# Altium footprint library WR-FPC_0.50mm.PcbLib: 147 footprints (part 10 of 10)
Each footprint in its own frame and in the unit in brackets; x right, y up, seen from the top. Pads: shape width x height; smd on the part's side, far side on the other; paste and mask are expansions set on the pad; w line width, h text height; cw(c..) or ccw(c..) is an arc to the next point about the centre after c.
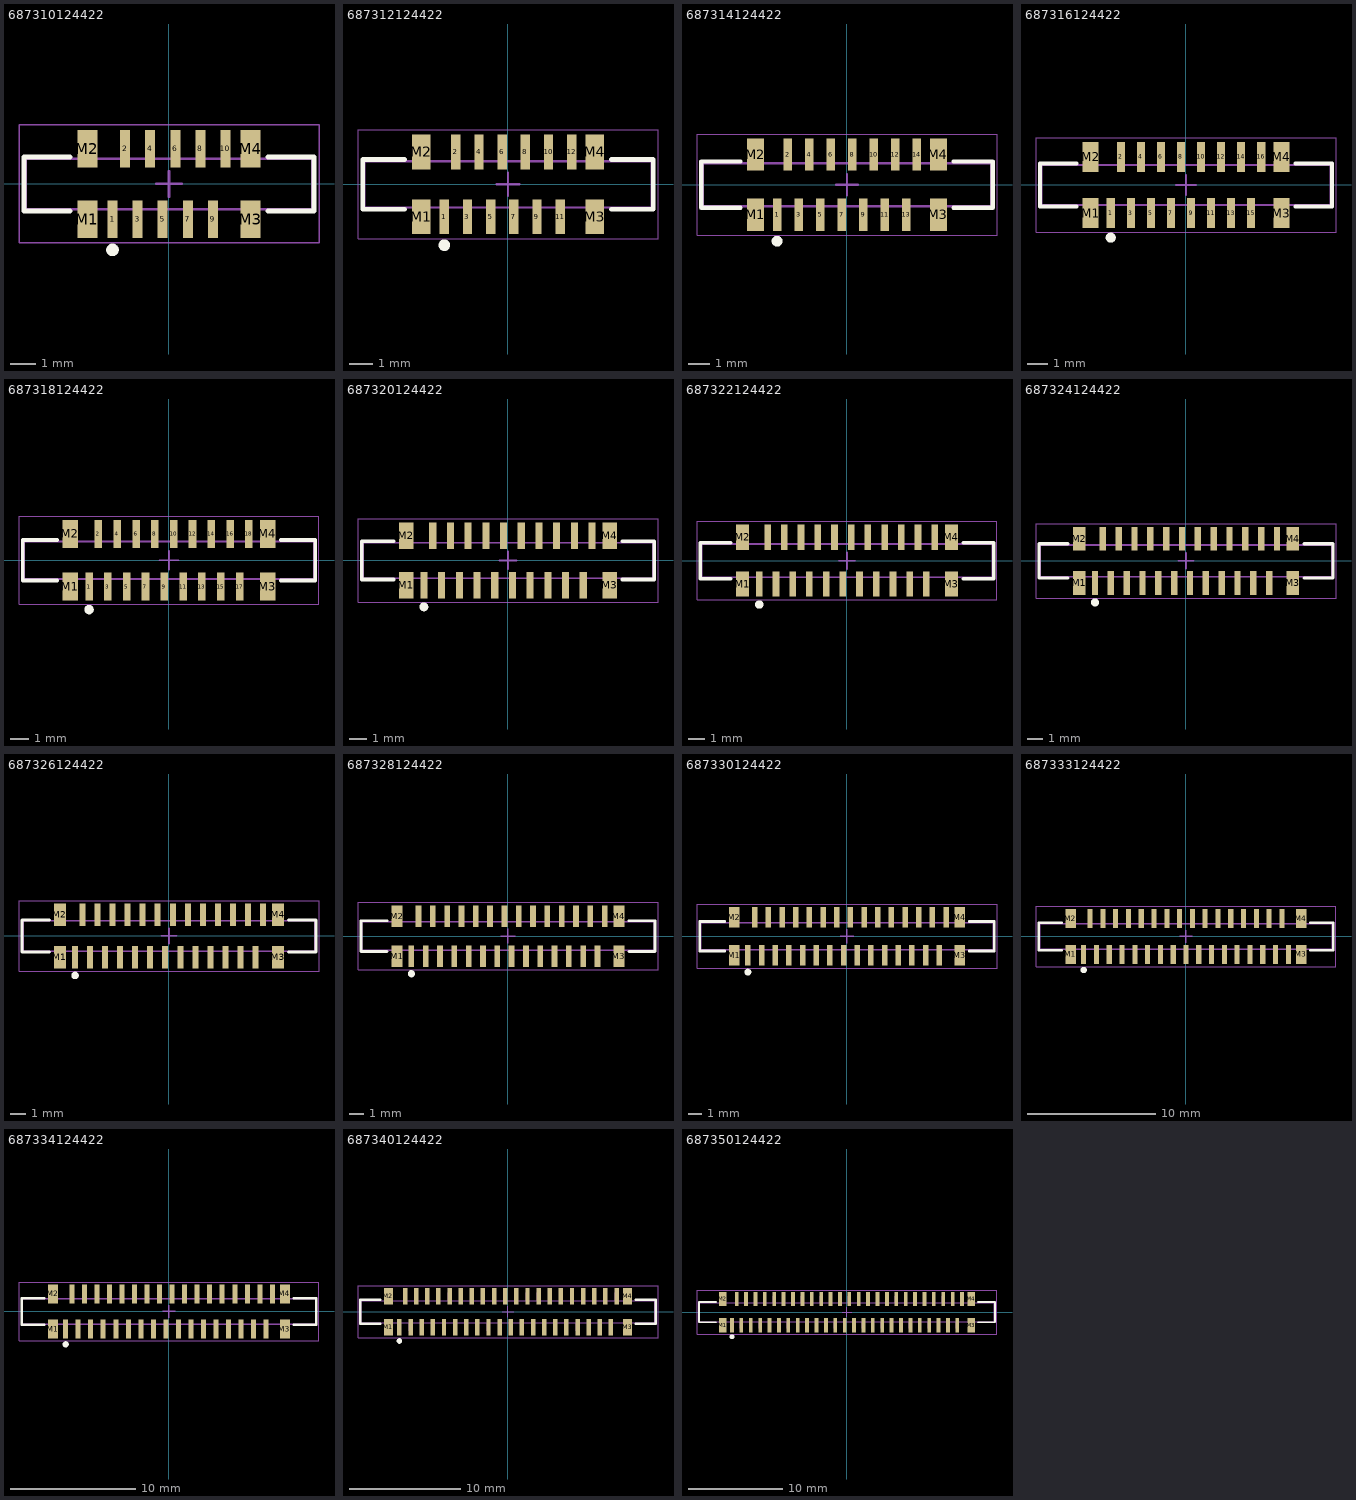
[diagram p9: the footprints below, top view; thin cyan lines are the x and y axes]

## 687310124422 [mm] "ZIF Connectors, Vertical, Type A, pitch 0.5mm, 10p"
height 4.5
pads (14):
  rect 0.4x1.5 smd: 1(-2.25,-1.4) 2(-1.75,1.4) 3(-1.25,-1.4) 4(-0.75,1.4) 5(-0.25,-1.4) 6(0.25,1.4) 7(0.75,-1.4) 8(1.25,1.4) 9(1.75,-1.4) 10(2.25,1.4)
  rect 0.8x1.5 smd: M1(-3.25,-1.4) M2(-3.25,1.4) M3(3.25,-1.4) M4(3.25,1.4)
Top Overlay:
  circle w0.25: c-2.25,-2.625 r0.125
  lines w0.2: -3.95,-1.075 -5.775,-1.075 -5.775,1.075 -3.95,1.075 ; 3.95,-1.075 5.775,-1.075 5.775,1.075 3.95,1.075
Top Assembly:
  lines w0.1: -3.35,-1 -3.35,-1.75 -3.15,-1.75 -3.15,-1 ; -3.35,1 -3.35,1.75 -3.15,1.75 -3.15,1 ; -2.35,-1 -2.35,-1.7 -2.15,-1.7 -2.15,-1 ; -1.85,1 -1.85,1.7 -1.65,1.7 -1.65,1 ; -1.35,-1 -1.35,-1.7 -1.15,-1.7 -1.15,-1 ; -0.85,1 -0.85,1.7 -0.65,1.7 -0.65,1 ; -0.35,-1 -0.35,-1.7 -0.15,-1.7 -0.15,-1 ; 0.15,1 0.15,1.7 0.35,1.7 0.35,1 ; 0.65,-1 0.65,-1.7 0.85,-1.7 0.85,-1 ; 1.15,1 1.15,1.7 1.35,1.7 1.35,1 ; 1.65,-1 1.65,-1.7 1.85,-1.7 1.85,-1 ; 2.15,1 2.15,1.7 2.35,1.7 2.35,1 ; 3.15,-1 3.15,-1.75 3.35,-1.75 3.35,-1 ; 3.15,1 3.15,1.75 3.35,1.75 3.35,1 ; -5.7,-1 5.7,-1 5.7,1 -5.7,1 -5.7,-1
Top Designator:
  text ".Designator" at -3.647,-0.357 h1
Top 3D Body:
  lines w0.1: -3.35,-1 -3.35,-1.75 -3.15,-1.75 -3.15,-1 ; -3.35,1 -3.35,1.75 -3.15,1.75 -3.15,1 ; -2.35,-1 -2.35,-1.7 -2.15,-1.7 -2.15,-1 ; -1.85,1 -1.85,1.7 -1.65,1.7 -1.65,1 ; -1.35,-1 -1.35,-1.7 -1.15,-1.7 -1.15,-1 ; -0.85,1 -0.85,1.7 -0.65,1.7 -0.65,1 ; -0.35,-1 -0.35,-1.7 -0.15,-1.7 -0.15,-1 ; 0.15,1 0.15,1.7 0.35,1.7 0.35,1 ; 0.65,-1 0.65,-1.7 0.85,-1.7 0.85,-1 ; 1.15,1 1.15,1.7 1.35,1.7 1.35,1 ; 1.65,-1 1.65,-1.7 1.85,-1.7 1.85,-1 ; 2.15,1 2.15,1.7 2.35,1.7 2.35,1 ; 3.15,-1 3.15,-1.75 3.35,-1.75 3.35,-1 ; 3.15,1 3.15,1.75 3.35,1.75 3.35,1 ; -5.7,-1 -5.7,1 5.7,1 5.7,-1 -5.7,-1
Top Courtyard:
  lines w0.05: -5.975,-2.35 5.975,-2.35 5.975,2.35 -5.975,2.35 -5.975,-2.35
Top Component Center:
  lines w0.1: -0.5,0 0.5,0 ; 0,-0.5 0,0.5
3D body "687310124422.stp": height 4.92, standoff 0.02, extent -5.7,-1.75 5.7,1.75

## 687312124422 [mm] "ZIF Connectors, Vertical, Type A, pitch 0.5mm, 12p"
height 4.5
pads (16):
  rect 0.4x1.5 smd: 1(-2.75,-1.4) 2(-2.25,1.4) 3(-1.75,-1.4) 4(-1.25,1.4) 5(-0.75,-1.4) 6(-0.25,1.4) 7(0.25,-1.4) 8(0.75,1.4) 9(1.25,-1.4) 10(1.75,1.4) 11(2.25,-1.4) 12(2.75,1.4)
  rect 0.8x1.5 smd: M1(-3.75,-1.4) M2(-3.75,1.4) M3(3.75,-1.4) M4(3.75,1.4)
Top Overlay:
  circle w0.25: c-2.75,-2.625 r0.125
  lines w0.2: -4.45,-1.075 -6.275,-1.075 -6.275,1.075 -4.45,1.075 ; 4.45,-1.075 6.275,-1.075 6.275,1.075 4.45,1.075
Top Assembly:
  lines w0.1: -3.85,-1 -3.85,-1.75 -3.65,-1.75 -3.65,-1 ; -3.85,1 -3.85,1.75 -3.65,1.75 -3.65,1 ; -2.85,-1 -2.85,-1.7 -2.65,-1.7 -2.65,-1 ; -2.35,1 -2.35,1.7 -2.15,1.7 -2.15,1 ; -1.85,-1 -1.85,-1.7 -1.65,-1.7 -1.65,-1 ; -1.35,1 -1.35,1.7 -1.15,1.7 -1.15,1 ; -0.85,-1 -0.85,-1.7 -0.65,-1.7 -0.65,-1 ; -0.35,1 -0.35,1.7 -0.15,1.7 -0.15,1 ; 0.15,-1 0.15,-1.7 0.35,-1.7 0.35,-1 ; 0.65,1 0.65,1.7 0.85,1.7 0.85,1 ; 1.15,-1 1.15,-1.7 1.35,-1.7 1.35,-1 ; 1.65,1 1.65,1.7 1.85,1.7 1.85,1 ; 2.15,-1 2.15,-1.7 2.35,-1.7 2.35,-1 ; 2.65,1 2.65,1.7 2.85,1.7 2.85,1 ; 3.65,-1 3.65,-1.75 3.85,-1.75 3.85,-1 ; 3.65,1 3.65,1.75 3.85,1.75 3.85,1 ; -6.2,-1 -6.2,1 6.2,1 6.2,-1 -6.2,-1
Top Designator:
  text ".Designator" at -3.647,-0.357 h1
Top 3D Body:
  lines w0.1: -3.85,-1 -3.85,-1.75 -3.65,-1.75 -3.65,-1 ; -3.85,1 -3.85,1.75 -3.65,1.75 -3.65,1 ; -2.85,-1 -2.85,-1.7 -2.65,-1.7 -2.65,-1 ; -2.35,1 -2.35,1.7 -2.15,1.7 -2.15,1 ; -1.85,-1 -1.85,-1.7 -1.65,-1.7 -1.65,-1 ; -1.35,1 -1.35,1.7 -1.15,1.7 -1.15,1 ; -0.85,-1 -0.85,-1.7 -0.65,-1.7 -0.65,-1 ; -0.35,1 -0.35,1.7 -0.15,1.7 -0.15,1 ; 0.15,-1 0.15,-1.7 0.35,-1.7 0.35,-1 ; 0.65,1 0.65,1.7 0.85,1.7 0.85,1 ; 1.15,-1 1.15,-1.7 1.35,-1.7 1.35,-1 ; 1.65,1 1.65,1.7 1.85,1.7 1.85,1 ; 2.15,-1 2.15,-1.7 2.35,-1.7 2.35,-1 ; 2.65,1 2.65,1.7 2.85,1.7 2.85,1 ; 3.65,-1 3.65,-1.75 3.85,-1.75 3.85,-1 ; 3.65,1 3.65,1.75 3.85,1.75 3.85,1 ; -6.2,-1 6.2,-1 6.2,1 -6.2,1 -6.2,-1
Top Courtyard:
  lines w0.05: -6.475,-2.35 -6.475,2.35 6.475,2.35 6.475,-2.35 -6.475,-2.35
Top Component Center:
  lines w0.1: -0.5,0 0.5,0 ; 0,-0.5 0,0.5
3D body "687312124422.stp": height 4.92, standoff 0.02, extent -6.2,-1.75 6.2,1.75

## 687314124422 [mm] "ZIF Connectors, Vertical, Type A, pitch 0.5mm, 14p"
height 4.5
pads (18):
  rect 0.4x1.5 smd: 1(-3.25,-1.4) 2(-2.75,1.4) 3(-2.25,-1.4) 4(-1.75,1.4) 5(-1.25,-1.4) 6(-0.75,1.4) 7(-0.25,-1.4) 8(0.25,1.4) 9(0.75,-1.4) 10(1.25,1.4) 11(1.75,-1.4) 12(2.25,1.4) 13(2.75,-1.4) 14(3.25,1.4)
  rect 0.8x1.5 smd: M1(-4.25,-1.4) M2(-4.25,1.4) M3(4.25,-1.4) M4(4.25,1.4)
Top Overlay:
  circle w0.25: c-3.25,-2.625 r0.125
  lines w0.2: -4.95,-1.075 -6.775,-1.075 -6.775,1.075 -4.95,1.075 ; 4.95,-1.075 6.775,-1.075 6.775,1.075 4.95,1.075
Top Assembly:
  lines w0.1: -4.35,-1 -4.35,-1.75 -4.15,-1.75 -4.15,-1 ; -4.35,1 -4.35,1.75 -4.15,1.75 -4.15,1 ; -3.35,-1 -3.35,-1.7 -3.15,-1.7 -3.15,-1 ; -2.85,1 -2.85,1.7 -2.65,1.7 -2.65,1 ; -2.35,-1 -2.35,-1.7 -2.15,-1.7 -2.15,-1 ; -1.85,1 -1.85,1.7 -1.65,1.7 -1.65,1 ; -1.35,-1 -1.35,-1.7 -1.15,-1.7 -1.15,-1 ; -0.85,1 -0.85,1.7 -0.65,1.7 -0.65,1 ; -0.35,-1 -0.35,-1.7 -0.15,-1.7 -0.15,-1 ; 0.15,1 0.15,1.7 0.35,1.7 0.35,1 ; 0.65,-1 0.65,-1.7 0.85,-1.7 0.85,-1 ; 1.15,1 1.15,1.7 1.35,1.7 1.35,1 ; 1.65,-1 1.65,-1.7 1.85,-1.7 1.85,-1 ; 2.15,1 2.15,1.7 2.35,1.7 2.35,1 ; 2.65,-1 2.65,-1.7 2.85,-1.7 2.85,-1 ; 3.15,1 3.15,1.7 3.35,1.7 3.35,1 ; 4.15,-1 4.15,-1.75 4.35,-1.75 4.35,-1 ; 4.15,1 4.15,1.75 4.35,1.75 4.35,1 ; -6.7,-1 6.7,-1 6.7,1 -6.7,1 -6.7,-1
Top Designator:
  text ".Designator" at -3.647,-0.357 h1
Top 3D Body:
  lines w0.1: -4.35,-1 -4.35,-1.75 -4.15,-1.75 -4.15,-1 ; -4.35,1 -4.35,1.75 -4.15,1.75 -4.15,1 ; -3.35,-1 -3.35,-1.7 -3.15,-1.7 -3.15,-1 ; -2.85,1 -2.85,1.7 -2.65,1.7 -2.65,1 ; -2.35,-1 -2.35,-1.7 -2.15,-1.7 -2.15,-1 ; -1.85,1 -1.85,1.7 -1.65,1.7 -1.65,1 ; -1.35,-1 -1.35,-1.7 -1.15,-1.7 -1.15,-1 ; -0.85,1 -0.85,1.7 -0.65,1.7 -0.65,1 ; -0.35,-1 -0.35,-1.7 -0.15,-1.7 -0.15,-1 ; 0.15,1 0.15,1.7 0.35,1.7 0.35,1 ; 0.65,-1 0.65,-1.7 0.85,-1.7 0.85,-1 ; 1.15,1 1.15,1.7 1.35,1.7 1.35,1 ; 1.65,-1 1.65,-1.7 1.85,-1.7 1.85,-1 ; 2.15,1 2.15,1.7 2.35,1.7 2.35,1 ; 2.65,-1 2.65,-1.7 2.85,-1.7 2.85,-1 ; 3.15,1 3.15,1.7 3.35,1.7 3.35,1 ; 4.15,-1 4.15,-1.75 4.35,-1.75 4.35,-1 ; 4.15,1 4.15,1.75 4.35,1.75 4.35,1 ; -6.7,-1 -6.7,1 6.7,1 6.7,-1 -6.7,-1
Top Courtyard:
  lines w0.05: -6.975,-2.35 6.975,-2.35 6.975,2.35 -6.975,2.35 -6.975,-2.35
Top Component Center:
  lines w0.1: -0.5,0 0.5,0 ; 0,-0.5 0,0.5
3D body "687314124422.stp": height 4.92, standoff 0.02, extent -6.7,-1.75 6.7,1.75

## 687316124422 [mm] "ZIF Connectors, Vertical, Type A, pitch 0.5mm, 16p"
height 4.5
pads (20):
  rect 0.4x1.5 smd: 1(-3.75,-1.4) 2(-3.25,1.4) 3(-2.75,-1.4) 4(-2.25,1.4) 5(-1.75,-1.4) 6(-1.25,1.4) 7(-0.75,-1.4) 8(-0.25,1.4) 9(0.25,-1.4) 10(0.75,1.4) 11(1.25,-1.4) 12(1.75,1.4) 13(2.25,-1.4) 14(2.75,1.4) 15(3.25,-1.4) 16(3.75,1.4)
  rect 0.8x1.5 smd: M1(-4.75,-1.4) M2(-4.75,1.4) M3(4.75,-1.4) M4(4.75,1.4)
Top Overlay:
  circle w0.25: c-3.75,-2.625 r0.125
  lines w0.2: -5.45,-1.075 -7.275,-1.075 -7.275,1.075 -5.45,1.075 ; 5.45,-1.075 7.275,-1.075 7.275,1.075 5.45,1.075
Top Assembly:
  lines w0.1: -4.85,-1 -4.85,-1.75 -4.65,-1.75 -4.65,-1 ; -4.85,1 -4.85,1.75 -4.65,1.75 -4.65,1 ; -3.85,-1 -3.85,-1.7 -3.65,-1.7 -3.65,-1 ; -3.35,1 -3.35,1.7 -3.15,1.7 -3.15,1 ; -2.85,-1 -2.85,-1.7 -2.65,-1.7 -2.65,-1 ; -2.35,1 -2.35,1.7 -2.15,1.7 -2.15,1 ; -1.85,-1 -1.85,-1.7 -1.65,-1.7 -1.65,-1 ; -1.35,1 -1.35,1.7 -1.15,1.7 -1.15,1 ; -0.85,-1 -0.85,-1.7 -0.65,-1.7 -0.65,-1 ; -0.35,1 -0.35,1.7 -0.15,1.7 -0.15,1 ; 0.15,-1 0.15,-1.7 0.35,-1.7 0.35,-1 ; 0.65,1 0.65,1.7 0.85,1.7 0.85,1 ; 1.15,-1 1.15,-1.7 1.35,-1.7 1.35,-1 ; 1.65,1 1.65,1.7 1.85,1.7 1.85,1 ; 2.15,-1 2.15,-1.7 2.35,-1.7 2.35,-1 ; 2.65,1 2.65,1.7 2.85,1.7 2.85,1 ; 3.15,-1 3.15,-1.7 3.35,-1.7 3.35,-1 ; 3.65,1 3.65,1.7 3.85,1.7 3.85,1 ; 4.65,-1 4.65,-1.75 4.85,-1.75 4.85,-1 ; 4.65,1 4.65,1.75 4.85,1.75 4.85,1 ; -7.2,-1 -7.2,1 7.2,1 7.2,-1 -7.2,-1
Top Designator:
  text ".Designator" at -3.647,-0.357 h1
Top 3D Body:
  lines w0.1: -4.85,-1 -4.85,-1.75 -4.65,-1.75 -4.65,-1 ; -4.85,1 -4.85,1.75 -4.65,1.75 -4.65,1 ; -3.85,-1 -3.85,-1.7 -3.65,-1.7 -3.65,-1 ; -3.35,1 -3.35,1.7 -3.15,1.7 -3.15,1 ; -2.85,-1 -2.85,-1.7 -2.65,-1.7 -2.65,-1 ; -2.35,1 -2.35,1.7 -2.15,1.7 -2.15,1 ; -1.85,-1 -1.85,-1.7 -1.65,-1.7 -1.65,-1 ; -1.35,1 -1.35,1.7 -1.15,1.7 -1.15,1 ; -0.85,-1 -0.85,-1.7 -0.65,-1.7 -0.65,-1 ; -0.35,1 -0.35,1.7 -0.15,1.7 -0.15,1 ; 0.15,-1 0.15,-1.7 0.35,-1.7 0.35,-1 ; 0.65,1 0.65,1.7 0.85,1.7 0.85,1 ; 1.15,-1 1.15,-1.7 1.35,-1.7 1.35,-1 ; 1.65,1 1.65,1.7 1.85,1.7 1.85,1 ; 2.15,-1 2.15,-1.7 2.35,-1.7 2.35,-1 ; 2.65,1 2.65,1.7 2.85,1.7 2.85,1 ; 3.15,-1 3.15,-1.7 3.35,-1.7 3.35,-1 ; 3.65,1 3.65,1.7 3.85,1.7 3.85,1 ; 4.65,-1 4.65,-1.75 4.85,-1.75 4.85,-1 ; 4.65,1 4.65,1.75 4.85,1.75 4.85,1 ; -7.2,-1 7.2,-1 7.2,1 -7.2,1 -7.2,-1
Top Courtyard:
  lines w0.05: -7.475,-2.35 -7.475,2.35 7.475,2.35 7.475,-2.35 -7.475,-2.35
Top Component Center:
  lines w0.1: -0.5,0 0.5,0 ; 0,-0.5 0,0.5
3D body "687316124422.stp": height 4.92, standoff 0.02, extent -7.2,-1.75 7.2,1.75

## 687318124422 [mm] "ZIF Connectors, Vertical, Type A, pitch 0.5mm, 18p"
height 4.5
pads (22):
  rect 0.4x1.5 smd: 1(-4.25,-1.4) 2(-3.75,1.4) 3(-3.25,-1.4) 4(-2.75,1.4) 5(-2.25,-1.4) 6(-1.75,1.4) 7(-1.25,-1.4) 8(-0.75,1.4) 9(-0.25,-1.4) 10(0.25,1.4) 11(0.75,-1.4) 12(1.25,1.4) 13(1.75,-1.4) 14(2.25,1.4) 15(2.75,-1.4) 16(3.25,1.4) 17(3.75,-1.4) 18(4.25,1.4)
  rect 0.8x1.5 smd: M1(-5.25,-1.4) M2(-5.25,1.4) M3(5.25,-1.4) M4(5.25,1.4)
Top Overlay:
  circle w0.25: c-4.25,-2.625 r0.125
  lines w0.2: -5.95,-1.075 -7.775,-1.075 -7.775,1.075 -5.95,1.075 ; 5.95,-1.075 7.775,-1.075 7.775,1.075 5.95,1.075
Top Assembly:
  lines w0.1: -5.35,-1 -5.35,-1.75 -5.15,-1.75 -5.15,-1 ; -5.35,1 -5.35,1.75 -5.15,1.75 -5.15,1 ; -4.35,-1 -4.35,-1.7 -4.15,-1.7 -4.15,-1 ; -3.85,1 -3.85,1.7 -3.65,1.7 -3.65,1 ; -3.35,-1 -3.35,-1.7 -3.15,-1.7 -3.15,-1 ; -2.85,1 -2.85,1.7 -2.65,1.7 -2.65,1 ; -2.35,-1 -2.35,-1.7 -2.15,-1.7 -2.15,-1 ; -1.85,1 -1.85,1.7 -1.65,1.7 -1.65,1 ; -1.35,-1 -1.35,-1.7 -1.15,-1.7 -1.15,-1 ; -0.85,1 -0.85,1.7 -0.65,1.7 -0.65,1 ; -0.35,-1 -0.35,-1.7 -0.15,-1.7 -0.15,-1 ; 0.15,1 0.15,1.7 0.35,1.7 0.35,1 ; 0.65,-1 0.65,-1.7 0.85,-1.7 0.85,-1 ; 1.15,1 1.15,1.7 1.35,1.7 1.35,1 ; 1.65,-1 1.65,-1.7 1.85,-1.7 1.85,-1 ; 2.15,1 2.15,1.7 2.35,1.7 2.35,1 ; 2.65,-1 2.65,-1.7 2.85,-1.7 2.85,-1 ; 3.15,1 3.15,1.7 3.35,1.7 3.35,1 ; 3.65,-1 3.65,-1.7 3.85,-1.7 3.85,-1 ; 4.15,1 4.15,1.7 4.35,1.7 4.35,1 ; 5.15,-1 5.15,-1.75 5.35,-1.75 5.35,-1 ; 5.15,1 5.15,1.75 5.35,1.75 5.35,1 ; -7.7,-1 7.7,-1 7.7,1 -7.7,1 -7.7,-1
Top Designator:
  text ".Designator" at -3.647,-0.357 h1
Top 3D Body:
  lines w0.1: -5.35,-1 -5.35,-1.75 -5.15,-1.75 -5.15,-1 ; -5.35,1 -5.35,1.75 -5.15,1.75 -5.15,1 ; -4.35,-1 -4.35,-1.7 -4.15,-1.7 -4.15,-1 ; -3.85,1 -3.85,1.7 -3.65,1.7 -3.65,1 ; -3.35,-1 -3.35,-1.7 -3.15,-1.7 -3.15,-1 ; -2.85,1 -2.85,1.7 -2.65,1.7 -2.65,1 ; -2.35,-1 -2.35,-1.7 -2.15,-1.7 -2.15,-1 ; -1.85,1 -1.85,1.7 -1.65,1.7 -1.65,1 ; -1.35,-1 -1.35,-1.7 -1.15,-1.7 -1.15,-1 ; -0.85,1 -0.85,1.7 -0.65,1.7 -0.65,1 ; -0.35,-1 -0.35,-1.7 -0.15,-1.7 -0.15,-1 ; 0.15,1 0.15,1.7 0.35,1.7 0.35,1 ; 0.65,-1 0.65,-1.7 0.85,-1.7 0.85,-1 ; 1.15,1 1.15,1.7 1.35,1.7 1.35,1 ; 1.65,-1 1.65,-1.7 1.85,-1.7 1.85,-1 ; 2.15,1 2.15,1.7 2.35,1.7 2.35,1 ; 2.65,-1 2.65,-1.7 2.85,-1.7 2.85,-1 ; 3.15,1 3.15,1.7 3.35,1.7 3.35,1 ; 3.65,-1 3.65,-1.7 3.85,-1.7 3.85,-1 ; 4.15,1 4.15,1.7 4.35,1.7 4.35,1 ; 5.15,-1 5.15,-1.75 5.35,-1.75 5.35,-1 ; 5.15,1 5.15,1.75 5.35,1.75 5.35,1 ; -7.7,-1 -7.7,1 7.7,1 7.7,-1 -7.7,-1
Top Courtyard:
  lines w0.05: -7.975,-2.35 7.975,-2.35 7.975,2.35 -7.975,2.35 -7.975,-2.35
Top Component Center:
  lines w0.1: -0.5,0 0.5,0 ; 0,-0.5 0,0.5
3D body "687318124422.stp": height 4.92, standoff 0.02, extent -7.7,-1.75 7.7,1.75

## 687320124422 [mm] "ZIF Connectors, Vertical, Type A, pitch 0.5mm, 20p"
height 4.5
pads (24):
  rect 0.4x1.5 smd: 1(-4.75,-1.4) 2(-4.25,1.4) 3(-3.75,-1.4) 4(-3.25,1.4) 5(-2.75,-1.4) 6(-2.25,1.4) 7(-1.75,-1.4) 8(-1.25,1.4) 9(-0.75,-1.4) 10(-0.25,1.4) 11(0.25,-1.4) 12(0.75,1.4) 13(1.25,-1.4) 14(1.75,1.4) 15(2.25,-1.4) 16(2.75,1.4) 17(3.25,-1.4) 18(3.75,1.4) 19(4.25,-1.4) 20(4.75,1.4)
  rect 0.8x1.5 smd: M1(-5.75,-1.4) M2(-5.75,1.4) M3(5.75,-1.4) M4(5.75,1.4)
Top Overlay:
  circle w0.25: c-4.75,-2.625 r0.125
  lines w0.2: -6.45,-1.075 -8.275,-1.075 -8.275,1.075 -6.45,1.075 ; 6.45,-1.075 8.275,-1.075 8.275,1.075 6.45,1.075
Top Assembly:
  lines w0.1: -5.85,-1 -5.85,-1.75 -5.65,-1.75 -5.65,-1 ; -5.85,1 -5.85,1.75 -5.65,1.75 -5.65,1 ; -4.85,-1 -4.85,-1.7 -4.65,-1.7 -4.65,-1 ; -4.35,1 -4.35,1.7 -4.15,1.7 -4.15,1 ; -3.85,-1 -3.85,-1.7 -3.65,-1.7 -3.65,-1 ; -3.35,1 -3.35,1.7 -3.15,1.7 -3.15,1 ; -2.85,-1 -2.85,-1.7 -2.65,-1.7 -2.65,-1 ; -2.35,1 -2.35,1.7 -2.15,1.7 -2.15,1 ; -1.85,-1 -1.85,-1.7 -1.65,-1.7 -1.65,-1 ; -1.35,1 -1.35,1.7 -1.15,1.7 -1.15,1 ; -0.85,-1 -0.85,-1.7 -0.65,-1.7 -0.65,-1 ; -0.35,1 -0.35,1.7 -0.15,1.7 -0.15,1 ; 0.15,-1 0.15,-1.7 0.35,-1.7 0.35,-1 ; 0.65,1 0.65,1.7 0.85,1.7 0.85,1 ; 1.15,-1 1.15,-1.7 1.35,-1.7 1.35,-1 ; 1.65,1 1.65,1.7 1.85,1.7 1.85,1 ; 2.15,-1 2.15,-1.7 2.35,-1.7 2.35,-1 ; 2.65,1 2.65,1.7 2.85,1.7 2.85,1 ; 3.15,-1 3.15,-1.7 3.35,-1.7 3.35,-1 ; 3.65,1 3.65,1.7 3.85,1.7 3.85,1 ; 4.15,-1 4.15,-1.7 4.35,-1.7 4.35,-1 ; 4.65,1 4.65,1.7 4.85,1.7 4.85,1 ; 5.65,-1 5.65,-1.75 5.85,-1.75 5.85,-1 ; 5.65,1 5.65,1.75 5.85,1.75 5.85,1 ; -8.2,-1 -8.2,1 8.2,1 8.2,-1 -8.2,-1
Top Designator:
  text ".Designator" at -3.647,-0.357 h1
Top 3D Body:
  lines w0.1: -5.85,-1 -5.85,-1.75 -5.65,-1.75 -5.65,-1 ; -5.85,1 -5.85,1.75 -5.65,1.75 -5.65,1 ; -4.85,-1 -4.85,-1.7 -4.65,-1.7 -4.65,-1 ; -4.35,1 -4.35,1.7 -4.15,1.7 -4.15,1 ; -3.85,-1 -3.85,-1.7 -3.65,-1.7 -3.65,-1 ; -3.35,1 -3.35,1.7 -3.15,1.7 -3.15,1 ; -2.85,-1 -2.85,-1.7 -2.65,-1.7 -2.65,-1 ; -2.35,1 -2.35,1.7 -2.15,1.7 -2.15,1 ; -1.85,-1 -1.85,-1.7 -1.65,-1.7 -1.65,-1 ; -1.35,1 -1.35,1.7 -1.15,1.7 -1.15,1 ; -0.85,-1 -0.85,-1.7 -0.65,-1.7 -0.65,-1 ; -0.35,1 -0.35,1.7 -0.15,1.7 -0.15,1 ; 0.15,-1 0.15,-1.7 0.35,-1.7 0.35,-1 ; 0.65,1 0.65,1.7 0.85,1.7 0.85,1 ; 1.15,-1 1.15,-1.7 1.35,-1.7 1.35,-1 ; 1.65,1 1.65,1.7 1.85,1.7 1.85,1 ; 2.15,-1 2.15,-1.7 2.35,-1.7 2.35,-1 ; 2.65,1 2.65,1.7 2.85,1.7 2.85,1 ; 3.15,-1 3.15,-1.7 3.35,-1.7 3.35,-1 ; 3.65,1 3.65,1.7 3.85,1.7 3.85,1 ; 4.15,-1 4.15,-1.7 4.35,-1.7 4.35,-1 ; 4.65,1 4.65,1.7 4.85,1.7 4.85,1 ; 5.65,-1 5.65,-1.75 5.85,-1.75 5.85,-1 ; 5.65,1 5.65,1.75 5.85,1.75 5.85,1 ; -8.2,-1 8.2,-1 8.2,1 -8.2,1 -8.2,-1
Top Courtyard:
  lines w0.05: -8.475,-2.35 -8.475,2.35 8.475,2.35 8.475,-2.35 -8.475,-2.35
Top Component Center:
  lines w0.1: -0.5,0 0.5,0 ; 0,-0.5 0,0.5
3D body "687320124422.stp": height 4.92, standoff 0.02, extent -8.2,-1.75 8.2,1.75

## 687322124422 [mm] "ZIF Connectors, Vertical, Type A, pitch 0.5mm, 22p"
height 4.5
pads (26):
  rect 0.4x1.5 smd: 1(-5.25,-1.4) 2(-4.75,1.4) 3(-4.25,-1.4) 4(-3.75,1.4) 5(-3.25,-1.4) 6(-2.75,1.4) 7(-2.25,-1.4) 8(-1.75,1.4) 9(-1.25,-1.4) 10(-0.75,1.4) 11(-0.25,-1.4) 12(0.25,1.4) 13(0.75,-1.4) 14(1.25,1.4) 15(1.75,-1.4) 16(2.25,1.4) 17(2.75,-1.4) 18(3.25,1.4) 19(3.75,-1.4) 20(4.25,1.4) 21(4.75,-1.4) 22(5.25,1.4)
  rect 0.8x1.5 smd: M1(-6.25,-1.4) M2(-6.25,1.4) M3(6.25,-1.4) M4(6.25,1.4)
Top Overlay:
  circle w0.25: c-5.25,-2.625 r0.125
  lines w0.2: -6.95,-1.075 -8.775,-1.075 -8.775,1.075 -6.95,1.075 ; 6.95,-1.075 8.775,-1.075 8.775,1.075 6.95,1.075
Top Assembly:
  lines w0.1: -6.35,-1 -6.35,-1.75 -6.15,-1.75 -6.15,-1 ; -6.35,1 -6.35,1.75 -6.15,1.75 -6.15,1 ; -5.35,-1 -5.35,-1.7 -5.15,-1.7 -5.15,-1 ; -4.85,1 -4.85,1.7 -4.65,1.7 -4.65,1 ; -4.35,-1 -4.35,-1.7 -4.15,-1.7 -4.15,-1 ; -3.85,1 -3.85,1.7 -3.65,1.7 -3.65,1 ; -3.35,-1 -3.35,-1.7 -3.15,-1.7 -3.15,-1 ; -2.85,1 -2.85,1.7 -2.65,1.7 -2.65,1 ; -2.35,-1 -2.35,-1.7 -2.15,-1.7 -2.15,-1 ; -1.85,1 -1.85,1.7 -1.65,1.7 -1.65,1 ; -1.35,-1 -1.35,-1.7 -1.15,-1.7 -1.15,-1 ; -0.85,1 -0.85,1.7 -0.65,1.7 -0.65,1 ; -0.35,-1 -0.35,-1.7 -0.15,-1.7 -0.15,-1 ; 0.15,1 0.15,1.7 0.35,1.7 0.35,1 ; 0.65,-1 0.65,-1.7 0.85,-1.7 0.85,-1 ; 1.15,1 1.15,1.7 1.35,1.7 1.35,1 ; 1.65,-1 1.65,-1.7 1.85,-1.7 1.85,-1 ; 2.15,1 2.15,1.7 2.35,1.7 2.35,1 ; 2.65,-1 2.65,-1.7 2.85,-1.7 2.85,-1 ; 3.15,1 3.15,1.7 3.35,1.7 3.35,1 ; 3.65,-1 3.65,-1.7 3.85,-1.7 3.85,-1 ; 4.15,1 4.15,1.7 4.35,1.7 4.35,1 ; 4.65,-1 4.65,-1.7 4.85,-1.7 4.85,-1 ; 5.15,1 5.15,1.7 5.35,1.7 5.35,1 ; 6.15,-1 6.15,-1.75 6.35,-1.75 6.35,-1 ; 6.15,1 6.15,1.75 6.35,1.75 6.35,1 ; -8.7,-1 -8.7,1 8.7,1 8.7,-1 -8.7,-1
Top Designator:
  text ".Designator" at -3.647,-0.357 h1
Top 3D Body:
  lines w0.1: -6.35,-1 -6.35,-1.75 -6.15,-1.75 -6.15,-1 ; -6.35,1 -6.35,1.75 -6.15,1.75 -6.15,1 ; -5.35,-1 -5.35,-1.7 -5.15,-1.7 -5.15,-1 ; -4.85,1 -4.85,1.7 -4.65,1.7 -4.65,1 ; -4.35,-1 -4.35,-1.7 -4.15,-1.7 -4.15,-1 ; -3.85,1 -3.85,1.7 -3.65,1.7 -3.65,1 ; -3.35,-1 -3.35,-1.7 -3.15,-1.7 -3.15,-1 ; -2.85,1 -2.85,1.7 -2.65,1.7 -2.65,1 ; -2.35,-1 -2.35,-1.7 -2.15,-1.7 -2.15,-1 ; -1.85,1 -1.85,1.7 -1.65,1.7 -1.65,1 ; -1.35,-1 -1.35,-1.7 -1.15,-1.7 -1.15,-1 ; -0.85,1 -0.85,1.7 -0.65,1.7 -0.65,1 ; -0.35,-1 -0.35,-1.7 -0.15,-1.7 -0.15,-1 ; 0.15,1 0.15,1.7 0.35,1.7 0.35,1 ; 0.65,-1 0.65,-1.7 0.85,-1.7 0.85,-1 ; 1.15,1 1.15,1.7 1.35,1.7 1.35,1 ; 1.65,-1 1.65,-1.7 1.85,-1.7 1.85,-1 ; 2.15,1 2.15,1.7 2.35,1.7 2.35,1 ; 2.65,-1 2.65,-1.7 2.85,-1.7 2.85,-1 ; 3.15,1 3.15,1.7 3.35,1.7 3.35,1 ; 3.65,-1 3.65,-1.7 3.85,-1.7 3.85,-1 ; 4.15,1 4.15,1.7 4.35,1.7 4.35,1 ; 4.65,-1 4.65,-1.7 4.85,-1.7 4.85,-1 ; 5.15,1 5.15,1.7 5.35,1.7 5.35,1 ; 6.15,-1 6.15,-1.75 6.35,-1.75 6.35,-1 ; 6.15,1 6.15,1.75 6.35,1.75 6.35,1 ; -8.7,-1 8.7,-1 8.7,1 -8.7,1 -8.7,-1
Top Courtyard:
  lines w0.05: -8.975,-2.35 -8.975,2.35 8.975,2.35 8.975,-2.35 -8.975,-2.35
Top Component Center:
  lines w0.1: -0.5,0 0.5,0 ; 0,-0.5 0,0.5
3D body "687322124422.stp": height 4.92, standoff 0.02, extent -8.7,-1.75 8.7,1.75

## 687324124422 [mm] "ZIF Connectors, Vertical, Type A, pitch 0.5mm, 24p"
height 4.5
pads (28):
  rect 0.4x1.5 smd: 1(-5.75,-1.4) 2(-5.25,1.4) 3(-4.75,-1.4) 4(-4.25,1.4) 5(-3.75,-1.4) 6(-3.25,1.4) 7(-2.75,-1.4) 8(-2.25,1.4) 9(-1.75,-1.4) 10(-1.25,1.4) 11(-0.75,-1.4) 12(-0.25,1.4) 13(0.25,-1.4) 14(0.75,1.4) 15(1.25,-1.4) 16(1.75,1.4) 17(2.25,-1.4) 18(2.75,1.4) 19(3.25,-1.4) 20(3.75,1.4) 21(4.25,-1.4) 22(4.75,1.4) 23(5.25,-1.4) 24(5.75,1.4)
  rect 0.8x1.5 smd: M1(-6.75,-1.4) M2(-6.75,1.4) M3(6.75,-1.4) M4(6.75,1.4)
Top Overlay:
  circle w0.25: c-5.75,-2.625 r0.125
  lines w0.2: -7.45,-1.075 -9.275,-1.075 -9.275,1.075 -7.45,1.075 ; 7.45,-1.075 9.275,-1.075 9.275,1.075 7.45,1.075
Top Assembly:
  lines w0.1: -6.85,-1 -6.85,-1.75 -6.65,-1.75 -6.65,-1 ; -6.85,1 -6.85,1.75 -6.65,1.75 -6.65,1 ; -5.85,-1 -5.85,-1.7 -5.65,-1.7 -5.65,-1 ; -5.35,1 -5.35,1.7 -5.15,1.7 -5.15,1 ; -4.85,-1 -4.85,-1.7 -4.65,-1.7 -4.65,-1 ; -4.35,1 -4.35,1.7 -4.15,1.7 -4.15,1 ; -3.85,-1 -3.85,-1.7 -3.65,-1.7 -3.65,-1 ; -3.35,1 -3.35,1.7 -3.15,1.7 -3.15,1 ; -2.85,-1 -2.85,-1.7 -2.65,-1.7 -2.65,-1 ; -2.35,1 -2.35,1.7 -2.15,1.7 -2.15,1 ; -1.85,-1 -1.85,-1.7 -1.65,-1.7 -1.65,-1 ; -1.35,1 -1.35,1.7 -1.15,1.7 -1.15,1 ; -0.85,-1 -0.85,-1.7 -0.65,-1.7 -0.65,-1 ; -0.35,1 -0.35,1.7 -0.15,1.7 -0.15,1 ; 0.15,-1 0.15,-1.7 0.35,-1.7 0.35,-1 ; 0.65,1 0.65,1.7 0.85,1.7 0.85,1 ; 1.15,-1 1.15,-1.7 1.35,-1.7 1.35,-1 ; 1.65,1 1.65,1.7 1.85,1.7 1.85,1 ; 2.15,-1 2.15,-1.7 2.35,-1.7 2.35,-1 ; 2.65,1 2.65,1.7 2.85,1.7 2.85,1 ; 3.15,-1 3.15,-1.7 3.35,-1.7 3.35,-1 ; 3.65,1 3.65,1.7 3.85,1.7 3.85,1 ; 4.15,-1 4.15,-1.7 4.35,-1.7 4.35,-1 ; 4.65,1 4.65,1.7 4.85,1.7 4.85,1 ; 5.15,-1 5.15,-1.7 5.35,-1.7 5.35,-1 ; 5.65,1 5.65,1.7 5.85,1.7 5.85,1 ; 6.65,-1 6.65,-1.75 6.85,-1.75 6.85,-1 ; 6.65,1 6.65,1.75 6.85,1.75 6.85,1 ; -9.2,-1 9.2,-1 9.2,1 -9.2,1 -9.2,-1
Top Designator:
  text ".Designator" at -3.647,-0.357 h1
Top 3D Body:
  lines w0.1: -6.85,-1 -6.85,-1.75 -6.65,-1.75 -6.65,-1 ; -6.85,1 -6.85,1.75 -6.65,1.75 -6.65,1 ; -5.85,-1 -5.85,-1.7 -5.65,-1.7 -5.65,-1 ; -5.35,1 -5.35,1.7 -5.15,1.7 -5.15,1 ; -4.85,-1 -4.85,-1.7 -4.65,-1.7 -4.65,-1 ; -4.35,1 -4.35,1.7 -4.15,1.7 -4.15,1 ; -3.85,-1 -3.85,-1.7 -3.65,-1.7 -3.65,-1 ; -3.35,1 -3.35,1.7 -3.15,1.7 -3.15,1 ; -2.85,-1 -2.85,-1.7 -2.65,-1.7 -2.65,-1 ; -2.35,1 -2.35,1.7 -2.15,1.7 -2.15,1 ; -1.85,-1 -1.85,-1.7 -1.65,-1.7 -1.65,-1 ; -1.35,1 -1.35,1.7 -1.15,1.7 -1.15,1 ; -0.85,-1 -0.85,-1.7 -0.65,-1.7 -0.65,-1 ; -0.35,1 -0.35,1.7 -0.15,1.7 -0.15,1 ; 0.15,-1 0.15,-1.7 0.35,-1.7 0.35,-1 ; 0.65,1 0.65,1.7 0.85,1.7 0.85,1 ; 1.15,-1 1.15,-1.7 1.35,-1.7 1.35,-1 ; 1.65,1 1.65,1.7 1.85,1.7 1.85,1 ; 2.15,-1 2.15,-1.7 2.35,-1.7 2.35,-1 ; 2.65,1 2.65,1.7 2.85,1.7 2.85,1 ; 3.15,-1 3.15,-1.7 3.35,-1.7 3.35,-1 ; 3.65,1 3.65,1.7 3.85,1.7 3.85,1 ; 4.15,-1 4.15,-1.7 4.35,-1.7 4.35,-1 ; 4.65,1 4.65,1.7 4.85,1.7 4.85,1 ; 5.15,-1 5.15,-1.7 5.35,-1.7 5.35,-1 ; 5.65,1 5.65,1.7 5.85,1.7 5.85,1 ; 6.65,-1 6.65,-1.75 6.85,-1.75 6.85,-1 ; 6.65,1 6.65,1.75 6.85,1.75 6.85,1 ; -9.2,-1 -9.2,1 9.2,1 9.2,-1 -9.2,-1
Top Courtyard:
  lines w0.05: -9.475,-2.35 9.475,-2.35 9.475,2.35 -9.475,2.35 -9.475,-2.35
Top Component Center:
  lines w0.1: -0.5,0 0.5,0 ; 0,-0.5 0,0.5
3D body "687324124422.stp": height 4.92, standoff 0.02, extent -9.2,-1.75 9.2,1.75

## 687326124422 [mm] "ZIF Connectors, Vertical, Type A, pitch 0.5mm, 26p"
height 4.5
pads (30):
  rect 0.4x1.5 smd: 1(-6.25,-1.4) 2(-5.75,1.4) 3(-5.25,-1.4) 4(-4.75,1.4) 5(-4.25,-1.4) 6(-3.75,1.4) 7(-3.25,-1.4) 8(-2.75,1.4) 9(-2.25,-1.4) 10(-1.75,1.4) 11(-1.25,-1.4) 12(-0.75,1.4) 13(-0.25,-1.4) 14(0.25,1.4) 15(0.75,-1.4) 16(1.25,1.4) 17(1.75,-1.4) 18(2.25,1.4) 19(2.75,-1.4) 20(3.25,1.4) 21(3.75,-1.4) 22(4.25,1.4) 23(4.75,-1.4) 24(5.25,1.4) 25(5.75,-1.4) 26(6.25,1.4)
  rect 0.8x1.5 smd: M1(-7.25,-1.4) M2(-7.25,1.4) M3(7.25,-1.4) M4(7.25,1.4)
Top Overlay:
  circle w0.25: c-6.25,-2.625 r0.125
  lines w0.2: -7.95,-1.075 -9.775,-1.075 -9.775,1.075 -7.95,1.075 ; 7.95,-1.075 9.775,-1.075 9.775,1.075 7.95,1.075
Top Assembly:
  lines w0.1: -7.35,-1 -7.35,-1.75 -7.15,-1.75 -7.15,-1 ; -7.35,1 -7.35,1.75 -7.15,1.75 -7.15,1 ; -6.35,-1 -6.35,-1.7 -6.15,-1.7 -6.15,-1 ; -5.85,1 -5.85,1.7 -5.65,1.7 -5.65,1 ; -5.35,-1 -5.35,-1.7 -5.15,-1.7 -5.15,-1 ; -4.85,1 -4.85,1.7 -4.65,1.7 -4.65,1 ; -4.35,-1 -4.35,-1.7 -4.15,-1.7 -4.15,-1 ; -3.85,1 -3.85,1.7 -3.65,1.7 -3.65,1 ; -3.35,-1 -3.35,-1.7 -3.15,-1.7 -3.15,-1 ; -2.85,1 -2.85,1.7 -2.65,1.7 -2.65,1 ; -2.35,-1 -2.35,-1.7 -2.15,-1.7 -2.15,-1 ; -1.85,1 -1.85,1.7 -1.65,1.7 -1.65,1 ; -1.35,-1 -1.35,-1.7 -1.15,-1.7 -1.15,-1 ; -0.85,1 -0.85,1.7 -0.65,1.7 -0.65,1 ; -0.35,-1 -0.35,-1.7 -0.15,-1.7 -0.15,-1 ; 0.15,1 0.15,1.7 0.35,1.7 0.35,1 ; 0.65,-1 0.65,-1.7 0.85,-1.7 0.85,-1 ; 1.15,1 1.15,1.7 1.35,1.7 1.35,1 ; 1.65,-1 1.65,-1.7 1.85,-1.7 1.85,-1 ; 2.15,1 2.15,1.7 2.35,1.7 2.35,1 ; 2.65,-1 2.65,-1.7 2.85,-1.7 2.85,-1 ; 3.15,1 3.15,1.7 3.35,1.7 3.35,1 ; 3.65,-1 3.65,-1.7 3.85,-1.7 3.85,-1 ; 4.15,1 4.15,1.7 4.35,1.7 4.35,1 ; 4.65,-1 4.65,-1.7 4.85,-1.7 4.85,-1 ; 5.15,1 5.15,1.7 5.35,1.7 5.35,1 ; 5.65,-1 5.65,-1.7 5.85,-1.7 5.85,-1 ; 6.15,1 6.15,1.7 6.35,1.7 6.35,1 ; 7.15,-1 7.15,-1.75 7.35,-1.75 7.35,-1 ; 7.15,1 7.15,1.75 7.35,1.75 7.35,1 ; -9.7,-1 9.7,-1 9.7,1 -9.7,1 -9.7,-1
Top Designator:
  text ".Designator" at -3.647,-0.357 h1
Top 3D Body:
  lines w0.1: -7.35,-1 -7.35,-1.75 -7.15,-1.75 -7.15,-1 ; -7.35,1 -7.35,1.75 -7.15,1.75 -7.15,1 ; -6.35,-1 -6.35,-1.7 -6.15,-1.7 -6.15,-1 ; -5.85,1 -5.85,1.7 -5.65,1.7 -5.65,1 ; -5.35,-1 -5.35,-1.7 -5.15,-1.7 -5.15,-1 ; -4.85,1 -4.85,1.7 -4.65,1.7 -4.65,1 ; -4.35,-1 -4.35,-1.7 -4.15,-1.7 -4.15,-1 ; -3.85,1 -3.85,1.7 -3.65,1.7 -3.65,1 ; -3.35,-1 -3.35,-1.7 -3.15,-1.7 -3.15,-1 ; -2.85,1 -2.85,1.7 -2.65,1.7 -2.65,1 ; -2.35,-1 -2.35,-1.7 -2.15,-1.7 -2.15,-1 ; -1.85,1 -1.85,1.7 -1.65,1.7 -1.65,1 ; -1.35,-1 -1.35,-1.7 -1.15,-1.7 -1.15,-1 ; -0.85,1 -0.85,1.7 -0.65,1.7 -0.65,1 ; -0.35,-1 -0.35,-1.7 -0.15,-1.7 -0.15,-1 ; 0.15,1 0.15,1.7 0.35,1.7 0.35,1 ; 0.65,-1 0.65,-1.7 0.85,-1.7 0.85,-1 ; 1.15,1 1.15,1.7 1.35,1.7 1.35,1 ; 1.65,-1 1.65,-1.7 1.85,-1.7 1.85,-1 ; 2.15,1 2.15,1.7 2.35,1.7 2.35,1 ; 2.65,-1 2.65,-1.7 2.85,-1.7 2.85,-1 ; 3.15,1 3.15,1.7 3.35,1.7 3.35,1 ; 3.65,-1 3.65,-1.7 3.85,-1.7 3.85,-1 ; 4.15,1 4.15,1.7 4.35,1.7 4.35,1 ; 4.65,-1 4.65,-1.7 4.85,-1.7 4.85,-1 ; 5.15,1 5.15,1.7 5.35,1.7 5.35,1 ; 5.65,-1 5.65,-1.7 5.85,-1.7 5.85,-1 ; 6.15,1 6.15,1.7 6.35,1.7 6.35,1 ; 7.15,-1 7.15,-1.75 7.35,-1.75 7.35,-1 ; 7.15,1 7.15,1.75 7.35,1.75 7.35,1 ; -9.7,-1 -9.7,1 9.7,1 9.7,-1 -9.7,-1
Top Courtyard:
  lines w0.05: -9.975,-2.35 9.975,-2.35 9.975,2.35 -9.975,2.35 -9.975,-2.35
Top Component Center:
  lines w0.1: -0.5,0 0.5,0 ; 0,-0.5 0,0.5
3D body "687326124422.stp": height 4.92, standoff 0.02, extent -9.7,-1.75 9.7,1.75

## 687328124422 [mm] "ZIF Connectors, Vertical, Type A, pitch 0.5mm, 28p"
height 4.5
pads (32):
  rect 0.4x1.5 smd: 1(-6.75,-1.4) 2(-6.25,1.4) 3(-5.75,-1.4) 4(-5.25,1.4) 5(-4.75,-1.4) 6(-4.25,1.4) 7(-3.75,-1.4) 8(-3.25,1.4) 9(-2.75,-1.4) 10(-2.25,1.4) 11(-1.75,-1.4) 12(-1.25,1.4) 13(-0.75,-1.4) 14(-0.25,1.4) 15(0.25,-1.4) 16(0.75,1.4) 17(1.25,-1.4) 18(1.75,1.4) 19(2.25,-1.4) 20(2.75,1.4) 21(3.25,-1.4) 22(3.75,1.4) 23(4.25,-1.4) 24(4.75,1.4) 25(5.25,-1.4) 26(5.75,1.4) 27(6.25,-1.4) 28(6.75,1.4)
  rect 0.8x1.5 smd: M1(-7.75,-1.4) M2(-7.75,1.4) M3(7.75,-1.4) M4(7.75,1.4)
Top Overlay:
  circle w0.25: c-6.75,-2.625 r0.125
  lines w0.2: -8.45,-1.075 -10.275,-1.075 -10.275,1.075 -8.45,1.075 ; 8.45,-1.075 10.275,-1.075 10.275,1.075 8.45,1.075
Top Assembly:
  lines w0.1: -7.85,-1 -7.85,-1.75 -7.65,-1.75 -7.65,-1 ; -7.85,1 -7.85,1.75 -7.65,1.75 -7.65,1 ; -6.85,-1 -6.85,-1.7 -6.65,-1.7 -6.65,-1 ; -6.35,1 -6.35,1.7 -6.15,1.7 -6.15,1 ; -5.85,-1 -5.85,-1.7 -5.65,-1.7 -5.65,-1 ; -5.35,1 -5.35,1.7 -5.15,1.7 -5.15,1 ; -4.85,-1 -4.85,-1.7 -4.65,-1.7 -4.65,-1 ; -4.35,1 -4.35,1.7 -4.15,1.7 -4.15,1 ; -3.85,-1 -3.85,-1.7 -3.65,-1.7 -3.65,-1 ; -3.35,1 -3.35,1.7 -3.15,1.7 -3.15,1 ; -2.85,-1 -2.85,-1.7 -2.65,-1.7 -2.65,-1 ; -2.35,1 -2.35,1.7 -2.15,1.7 -2.15,1 ; -1.85,-1 -1.85,-1.7 -1.65,-1.7 -1.65,-1 ; -1.35,1 -1.35,1.7 -1.15,1.7 -1.15,1 ; -0.85,-1 -0.85,-1.7 -0.65,-1.7 -0.65,-1 ; -0.35,1 -0.35,1.7 -0.15,1.7 -0.15,1 ; 0.15,-1 0.15,-1.7 0.35,-1.7 0.35,-1 ; 0.65,1 0.65,1.7 0.85,1.7 0.85,1 ; 1.15,-1 1.15,-1.7 1.35,-1.7 1.35,-1 ; 1.65,1 1.65,1.7 1.85,1.7 1.85,1 ; 2.15,-1 2.15,-1.7 2.35,-1.7 2.35,-1 ; 2.65,1 2.65,1.7 2.85,1.7 2.85,1 ; 3.15,-1 3.15,-1.7 3.35,-1.7 3.35,-1 ; 3.65,1 3.65,1.7 3.85,1.7 3.85,1 ; 4.15,-1 4.15,-1.7 4.35,-1.7 4.35,-1 ; 4.65,1 4.65,1.7 4.85,1.7 4.85,1 ; 5.15,-1 5.15,-1.7 5.35,-1.7 5.35,-1 ; 5.65,1 5.65,1.7 5.85,1.7 5.85,1 ; 6.15,-1 6.15,-1.7 6.35,-1.7 6.35,-1 ; 6.65,1 6.65,1.7 6.85,1.7 6.85,1 ; 7.65,-1 7.65,-1.75 7.85,-1.75 7.85,-1 ; 7.65,1 7.65,1.75 7.85,1.75 7.85,1 ; -10.2,-1 -10.2,1 10.2,1 10.2,-1 -10.2,-1
Top Designator:
  text ".Designator" at -3.647,-0.357 h1
Top 3D Body:
  lines w0.1: -7.85,-1 -7.85,-1.75 -7.65,-1.75 -7.65,-1 ; -7.85,1 -7.85,1.75 -7.65,1.75 -7.65,1 ; -6.85,-1 -6.85,-1.7 -6.65,-1.7 -6.65,-1 ; -6.35,1 -6.35,1.7 -6.15,1.7 -6.15,1 ; -5.85,-1 -5.85,-1.7 -5.65,-1.7 -5.65,-1 ; -5.35,1 -5.35,1.7 -5.15,1.7 -5.15,1 ; -4.85,-1 -4.85,-1.7 -4.65,-1.7 -4.65,-1 ; -4.35,1 -4.35,1.7 -4.15,1.7 -4.15,1 ; -3.85,-1 -3.85,-1.7 -3.65,-1.7 -3.65,-1 ; -3.35,1 -3.35,1.7 -3.15,1.7 -3.15,1 ; -2.85,-1 -2.85,-1.7 -2.65,-1.7 -2.65,-1 ; -2.35,1 -2.35,1.7 -2.15,1.7 -2.15,1 ; -1.85,-1 -1.85,-1.7 -1.65,-1.7 -1.65,-1 ; -1.35,1 -1.35,1.7 -1.15,1.7 -1.15,1 ; -0.85,-1 -0.85,-1.7 -0.65,-1.7 -0.65,-1 ; -0.35,1 -0.35,1.7 -0.15,1.7 -0.15,1 ; 0.15,-1 0.15,-1.7 0.35,-1.7 0.35,-1 ; 0.65,1 0.65,1.7 0.85,1.7 0.85,1 ; 1.15,-1 1.15,-1.7 1.35,-1.7 1.35,-1 ; 1.65,1 1.65,1.7 1.85,1.7 1.85,1 ; 2.15,-1 2.15,-1.7 2.35,-1.7 2.35,-1 ; 2.65,1 2.65,1.7 2.85,1.7 2.85,1 ; 3.15,-1 3.15,-1.7 3.35,-1.7 3.35,-1 ; 3.65,1 3.65,1.7 3.85,1.7 3.85,1 ; 4.15,-1 4.15,-1.7 4.35,-1.7 4.35,-1 ; 4.65,1 4.65,1.7 4.85,1.7 4.85,1 ; 5.15,-1 5.15,-1.7 5.35,-1.7 5.35,-1 ; 5.65,1 5.65,1.7 5.85,1.7 5.85,1 ; 6.15,-1 6.15,-1.7 6.35,-1.7 6.35,-1 ; 6.65,1 6.65,1.7 6.85,1.7 6.85,1 ; 7.65,-1 7.65,-1.75 7.85,-1.75 7.85,-1 ; 7.65,1 7.65,1.75 7.85,1.75 7.85,1 ; -10.2,-1 10.2,-1 10.2,1 -10.2,1 -10.2,-1
Top Courtyard:
  lines w0.05: -10.475,-2.35 -10.475,2.35 10.475,2.35 10.475,-2.35 -10.475,-2.35
Top Component Center:
  lines w0.1: -0.5,0 0.5,0 ; 0,-0.5 0,0.5
3D body "687328124422.stp": height 4.92, standoff 0.02, extent -10.2,-1.75 10.2,1.75

## 687330124422 [mm] "ZIF Connectors, Vertical, Type A, pitch 0.5mm, 30p"
height 4.5
pads (34):
  rect 0.4x1.5 smd: 1(-7.25,-1.4) 2(-6.75,1.4) 3(-6.25,-1.4) 4(-5.75,1.4) 5(-5.25,-1.4) 6(-4.75,1.4) 7(-4.25,-1.4) 8(-3.75,1.4) 9(-3.25,-1.4) 10(-2.75,1.4) 11(-2.25,-1.4) 12(-1.75,1.4) 13(-1.25,-1.4) 14(-0.75,1.4) 15(-0.25,-1.4) 16(0.25,1.4) 17(0.75,-1.4) 18(1.25,1.4) 19(1.75,-1.4) 20(2.25,1.4) 21(2.75,-1.4) 22(3.25,1.4) 23(3.75,-1.4) 24(4.25,1.4) 25(4.75,-1.4) 26(5.25,1.4) 27(5.75,-1.4) 28(6.25,1.4) 29(6.75,-1.4) 30(7.25,1.4)
  rect 0.8x1.5 smd: M1(-8.25,-1.4) M2(-8.25,1.4) M3(8.25,-1.4) M4(8.25,1.4)
Top Overlay:
  circle w0.25: c-7.25,-2.625 r0.125
  lines w0.2: -8.95,-1.075 -10.775,-1.075 -10.775,1.075 -8.95,1.075 ; 8.95,-1.075 10.775,-1.075 10.775,1.075 8.95,1.075
Top Assembly:
  lines w0.1: -8.35,-1 -8.35,-1.75 -8.15,-1.75 -8.15,-1 ; -8.35,1 -8.35,1.75 -8.15,1.75 -8.15,1 ; -7.35,-1 -7.35,-1.7 -7.15,-1.7 -7.15,-1 ; -6.85,1 -6.85,1.7 -6.65,1.7 -6.65,1 ; -6.35,-1 -6.35,-1.7 -6.15,-1.7 -6.15,-1 ; -5.85,1 -5.85,1.7 -5.65,1.7 -5.65,1 ; -5.35,-1 -5.35,-1.7 -5.15,-1.7 -5.15,-1 ; -4.85,1 -4.85,1.7 -4.65,1.7 -4.65,1 ; -4.35,-1 -4.35,-1.7 -4.15,-1.7 -4.15,-1 ; -3.85,1 -3.85,1.7 -3.65,1.7 -3.65,1 ; -3.35,-1 -3.35,-1.7 -3.15,-1.7 -3.15,-1 ; -2.85,1 -2.85,1.7 -2.65,1.7 -2.65,1 ; -2.35,-1 -2.35,-1.7 -2.15,-1.7 -2.15,-1 ; -1.85,1 -1.85,1.7 -1.65,1.7 -1.65,1 ; -1.35,-1 -1.35,-1.7 -1.15,-1.7 -1.15,-1 ; -0.85,1 -0.85,1.7 -0.65,1.7 -0.65,1 ; -0.35,-1 -0.35,-1.7 -0.15,-1.7 -0.15,-1 ; 0.15,1 0.15,1.7 0.35,1.7 0.35,1 ; 0.65,-1 0.65,-1.7 0.85,-1.7 0.85,-1 ; 1.15,1 1.15,1.7 1.35,1.7 1.35,1 ; 1.65,-1 1.65,-1.7 1.85,-1.7 1.85,-1 ; 2.15,1 2.15,1.7 2.35,1.7 2.35,1 ; 2.65,-1 2.65,-1.7 2.85,-1.7 2.85,-1 ; 3.15,1 3.15,1.7 3.35,1.7 3.35,1 ; 3.65,-1 3.65,-1.7 3.85,-1.7 3.85,-1 ; 4.15,1 4.15,1.7 4.35,1.7 4.35,1 ; 4.65,-1 4.65,-1.7 4.85,-1.7 4.85,-1 ; 5.15,1 5.15,1.7 5.35,1.7 5.35,1 ; 5.65,-1 5.65,-1.7 5.85,-1.7 5.85,-1 ; 6.15,1 6.15,1.7 6.35,1.7 6.35,1 ; 6.65,-1 6.65,-1.7 6.85,-1.7 6.85,-1 ; 7.15,1 7.15,1.7 7.35,1.7 7.35,1 ; 8.15,-1 8.15,-1.75 8.35,-1.75 8.35,-1 ; 8.15,1 8.15,1.75 8.35,1.75 8.35,1 ; -10.7,-1 -10.7,1 10.7,1 10.7,-1 -10.7,-1
Top Designator:
  text ".Designator" at -3.647,-0.357 h1
Top 3D Body:
  lines w0.1: -8.35,-1 -8.35,-1.75 -8.15,-1.75 -8.15,-1 ; -8.35,1 -8.35,1.75 -8.15,1.75 -8.15,1 ; -7.35,-1 -7.35,-1.7 -7.15,-1.7 -7.15,-1 ; -6.85,1 -6.85,1.7 -6.65,1.7 -6.65,1 ; -6.35,-1 -6.35,-1.7 -6.15,-1.7 -6.15,-1 ; -5.85,1 -5.85,1.7 -5.65,1.7 -5.65,1 ; -5.35,-1 -5.35,-1.7 -5.15,-1.7 -5.15,-1 ; -4.85,1 -4.85,1.7 -4.65,1.7 -4.65,1 ; -4.35,-1 -4.35,-1.7 -4.15,-1.7 -4.15,-1 ; -3.85,1 -3.85,1.7 -3.65,1.7 -3.65,1 ; -3.35,-1 -3.35,-1.7 -3.15,-1.7 -3.15,-1 ; -2.85,1 -2.85,1.7 -2.65,1.7 -2.65,1 ; -2.35,-1 -2.35,-1.7 -2.15,-1.7 -2.15,-1 ; -1.85,1 -1.85,1.7 -1.65,1.7 -1.65,1 ; -1.35,-1 -1.35,-1.7 -1.15,-1.7 -1.15,-1 ; -0.85,1 -0.85,1.7 -0.65,1.7 -0.65,1 ; -0.35,-1 -0.35,-1.7 -0.15,-1.7 -0.15,-1 ; 0.15,1 0.15,1.7 0.35,1.7 0.35,1 ; 0.65,-1 0.65,-1.7 0.85,-1.7 0.85,-1 ; 1.15,1 1.15,1.7 1.35,1.7 1.35,1 ; 1.65,-1 1.65,-1.7 1.85,-1.7 1.85,-1 ; 2.15,1 2.15,1.7 2.35,1.7 2.35,1 ; 2.65,-1 2.65,-1.7 2.85,-1.7 2.85,-1 ; 3.15,1 3.15,1.7 3.35,1.7 3.35,1 ; 3.65,-1 3.65,-1.7 3.85,-1.7 3.85,-1 ; 4.15,1 4.15,1.7 4.35,1.7 4.35,1 ; 4.65,-1 4.65,-1.7 4.85,-1.7 4.85,-1 ; 5.15,1 5.15,1.7 5.35,1.7 5.35,1 ; 5.65,-1 5.65,-1.7 5.85,-1.7 5.85,-1 ; 6.15,1 6.15,1.7 6.35,1.7 6.35,1 ; 6.65,-1 6.65,-1.7 6.85,-1.7 6.85,-1 ; 7.15,1 7.15,1.7 7.35,1.7 7.35,1 ; 8.15,-1 8.15,-1.75 8.35,-1.75 8.35,-1 ; 8.15,1 8.15,1.75 8.35,1.75 8.35,1 ; -10.7,-1 10.7,-1 10.7,1 -10.7,1 -10.7,-1
Top Courtyard:
  lines w0.05: -10.975,-2.35 -10.975,2.35 10.975,2.35 10.975,-2.35 -10.975,-2.35
Top Component Center:
  lines w0.1: -0.5,0 0.5,0 ; 0,-0.5 0,0.5
3D body "687330124422.stp": height 4.92, standoff 0.02, extent -10.7,-1.75 10.7,1.75

## 687333124422 [mm] "ZIF Connectors, Vertical, Type A, pitch 0.5mm, 33p"
height 4.5
pads (37):
  rect 0.4x1.5 smd: 1(-8,-1.4) 2(-7.5,1.4) 3(-7,-1.4) 4(-6.5,1.4) 5(-6,-1.4) 6(-5.5,1.4) 7(-5,-1.4) 8(-4.5,1.4) 9(-4,-1.4) 10(-3.5,1.4) 11(-3,-1.4) 12(-2.5,1.4) 13(-2,-1.4) 14(-1.5,1.4) 15(-1,-1.4) 16(-0.5,1.4) 17(0,-1.4) 18(0.5,1.4) 19(1,-1.4) 20(1.5,1.4) 21(2,-1.4) 22(2.5,1.4) 23(3,-1.4) 24(3.5,1.4) 25(4,-1.4) 26(4.5,1.4) 27(5,-1.4) 28(5.5,1.4) 29(6,-1.4) 30(6.5,1.4) 31(7,-1.4) 32(7.5,1.4) 33(8,-1.4)
  rect 0.8x1.5 smd: M1(-9,-1.4) M2(-9,1.4) M3(9,-1.4) M4(9,1.4)
Top Overlay:
  circle w0.25: c-8,-2.625 r0.125
  lines w0.2: -9.7,-1.075 -11.525,-1.075 -11.525,1.075 -9.7,1.075 ; 9.7,-1.075 11.525,-1.075 11.525,1.075 9.7,1.075
Top Assembly:
  lines w0.1: -9.1,-1 -9.1,-1.75 -8.9,-1.75 -8.9,-1 ; -9.1,1 -9.1,1.75 -8.9,1.75 -8.9,1 ; -8.1,-1 -8.1,-1.7 -7.9,-1.7 -7.9,-1 ; -7.6,1 -7.6,1.7 -7.4,1.7 -7.4,1 ; -7.1,-1 -7.1,-1.7 -6.9,-1.7 -6.9,-1 ; -6.6,1 -6.6,1.7 -6.4,1.7 -6.4,1 ; -6.1,-1 -6.1,-1.7 -5.9,-1.7 -5.9,-1 ; -5.6,1 -5.6,1.7 -5.4,1.7 -5.4,1 ; -5.1,-1 -5.1,-1.7 -4.9,-1.7 -4.9,-1 ; -4.6,1 -4.6,1.7 -4.4,1.7 -4.4,1 ; -4.1,-1 -4.1,-1.7 -3.9,-1.7 -3.9,-1 ; -3.6,1 -3.6,1.7 -3.4,1.7 -3.4,1 ; -3.1,-1 -3.1,-1.7 -2.9,-1.7 -2.9,-1 ; -2.6,1 -2.6,1.7 -2.4,1.7 -2.4,1 ; -2.1,-1 -2.1,-1.7 -1.9,-1.7 -1.9,-1 ; -1.6,1 -1.6,1.7 -1.4,1.7 -1.4,1 ; -1.1,-1 -1.1,-1.7 -0.9,-1.7 -0.9,-1 ; -0.6,1 -0.6,1.7 -0.4,1.7 -0.4,1 ; -0.1,-1 -0.1,-1.7 0.1,-1.7 0.1,-1 ; 0.4,1 0.4,1.7 0.6,1.7 0.6,1 ; 0.9,-1 0.9,-1.7 1.1,-1.7 1.1,-1 ; 1.4,1 1.4,1.7 1.6,1.7 1.6,1 ; 1.9,-1 1.9,-1.7 2.1,-1.7 2.1,-1 ; 2.4,1 2.4,1.7 2.6,1.7 2.6,1 ; 2.9,-1 2.9,-1.7 3.1,-1.7 3.1,-1 ; 3.4,1 3.4,1.7 3.6,1.7 3.6,1 ; 3.9,-1 3.9,-1.7 4.1,-1.7 4.1,-1 ; 4.4,1 4.4,1.7 4.6,1.7 4.6,1 ; 4.9,-1 4.9,-1.7 5.1,-1.7 5.1,-1 ; 5.4,1 5.4,1.7 5.6,1.7 5.6,1 ; 5.9,-1 5.9,-1.7 6.1,-1.7 6.1,-1 ; 6.4,1 6.4,1.7 6.6,1.7 6.6,1 ; 6.9,-1 6.9,-1.7 7.1,-1.7 7.1,-1 ; 7.4,1 7.4,1.7 7.6,1.7 7.6,1 ; 7.9,-1 7.9,-1.7 8.1,-1.7 8.1,-1 ; 8.9,-1 8.9,-1.75 9.1,-1.75 9.1,-1 ; 8.9,1 8.9,1.75 9.1,1.75 9.1,1 ; -11.45,-1 11.45,-1 11.45,1 -11.45,1 -11.45,-1
Top Designator:
  text ".Designator" at -3.647,-0.357 h1
Top 3D Body:
  lines w0.1: -9.1,-1 -9.1,-1.75 -8.9,-1.75 -8.9,-1 ; -9.1,1 -9.1,1.75 -8.9,1.75 -8.9,1 ; -8.1,-1 -8.1,-1.7 -7.9,-1.7 -7.9,-1 ; -7.6,1 -7.6,1.7 -7.4,1.7 -7.4,1 ; -7.1,-1 -7.1,-1.7 -6.9,-1.7 -6.9,-1 ; -6.6,1 -6.6,1.7 -6.4,1.7 -6.4,1 ; -6.1,-1 -6.1,-1.7 -5.9,-1.7 -5.9,-1 ; -5.6,1 -5.6,1.7 -5.4,1.7 -5.4,1 ; -5.1,-1 -5.1,-1.7 -4.9,-1.7 -4.9,-1 ; -4.6,1 -4.6,1.7 -4.4,1.7 -4.4,1 ; -4.1,-1 -4.1,-1.7 -3.9,-1.7 -3.9,-1 ; -3.6,1 -3.6,1.7 -3.4,1.7 -3.4,1 ; -3.1,-1 -3.1,-1.7 -2.9,-1.7 -2.9,-1 ; -2.6,1 -2.6,1.7 -2.4,1.7 -2.4,1 ; -2.1,-1 -2.1,-1.7 -1.9,-1.7 -1.9,-1 ; -1.6,1 -1.6,1.7 -1.4,1.7 -1.4,1 ; -1.1,-1 -1.1,-1.7 -0.9,-1.7 -0.9,-1 ; -0.6,1 -0.6,1.7 -0.4,1.7 -0.4,1 ; -0.1,-1 -0.1,-1.7 0.1,-1.7 0.1,-1 ; 0.4,1 0.4,1.7 0.6,1.7 0.6,1 ; 0.9,-1 0.9,-1.7 1.1,-1.7 1.1,-1 ; 1.4,1 1.4,1.7 1.6,1.7 1.6,1 ; 1.9,-1 1.9,-1.7 2.1,-1.7 2.1,-1 ; 2.4,1 2.4,1.7 2.6,1.7 2.6,1 ; 2.9,-1 2.9,-1.7 3.1,-1.7 3.1,-1 ; 3.4,1 3.4,1.7 3.6,1.7 3.6,1 ; 3.9,-1 3.9,-1.7 4.1,-1.7 4.1,-1 ; 4.4,1 4.4,1.7 4.6,1.7 4.6,1 ; 4.9,-1 4.9,-1.7 5.1,-1.7 5.1,-1 ; 5.4,1 5.4,1.7 5.6,1.7 5.6,1 ; 5.9,-1 5.9,-1.7 6.1,-1.7 6.1,-1 ; 6.4,1 6.4,1.7 6.6,1.7 6.6,1 ; 6.9,-1 6.9,-1.7 7.1,-1.7 7.1,-1 ; 7.4,1 7.4,1.7 7.6,1.7 7.6,1 ; 7.9,-1 7.9,-1.7 8.1,-1.7 8.1,-1 ; 8.9,-1 8.9,-1.75 9.1,-1.75 9.1,-1 ; 8.9,1 8.9,1.75 9.1,1.75 9.1,1 ; -11.45,-1 -11.45,1 11.45,1 11.45,-1 -11.45,-1
Top Courtyard:
  lines w0.05: -11.725,-2.35 11.725,-2.35 11.725,2.35 -11.725,2.35 -11.725,-2.35
Top Component Center:
  lines w0.1: -0.5,0 0.5,0 ; 0,-0.5 0,0.5
3D body "687333124422.stp": height 4.92, standoff 0.02, extent -11.45,-1.75 11.45,1.75

## 687334124422 [mm] "ZIF Connectors, Vertical, Type A, pitch 0.5mm, 34p"
height 4.5
pads (38):
  rect 0.4x1.5 smd: 1(-8.25,-1.4) 2(-7.75,1.4) 3(-7.25,-1.4) 4(-6.75,1.4) 5(-6.25,-1.4) 6(-5.75,1.4) 7(-5.25,-1.4) 8(-4.75,1.4) 9(-4.25,-1.4) 10(-3.75,1.4) 11(-3.25,-1.4) 12(-2.75,1.4) 13(-2.25,-1.4) 14(-1.75,1.4) 15(-1.25,-1.4) 16(-0.75,1.4) 17(-0.25,-1.4) 18(0.25,1.4) 19(0.75,-1.4) 20(1.25,1.4) 21(1.75,-1.4) 22(2.25,1.4) 23(2.75,-1.4) 24(3.25,1.4) 25(3.75,-1.4) 26(4.25,1.4) 27(4.75,-1.4) 28(5.25,1.4) 29(5.75,-1.4) 30(6.25,1.4) 31(6.75,-1.4) 32(7.25,1.4) 33(7.75,-1.4) 34(8.25,1.4)
  rect 0.8x1.5 smd: M1(-9.25,-1.4) M2(-9.25,1.4) M3(9.25,-1.4) M4(9.25,1.4)
Top Overlay:
  circle w0.25: c-8.25,-2.625 r0.125
  lines w0.2: -9.95,-1.075 -11.775,-1.075 -11.775,1.075 -9.95,1.075 ; 9.95,-1.075 11.775,-1.075 11.775,1.075 9.95,1.075
Top Assembly:
  lines w0.1: -9.35,-1 -9.35,-1.75 -9.15,-1.75 -9.15,-1 ; -9.35,1 -9.35,1.75 -9.15,1.75 -9.15,1 ; -8.35,-1 -8.35,-1.7 -8.15,-1.7 -8.15,-1 ; -7.85,1 -7.85,1.7 -7.65,1.7 -7.65,1 ; -7.35,-1 -7.35,-1.7 -7.15,-1.7 -7.15,-1 ; -6.85,1 -6.85,1.7 -6.65,1.7 -6.65,1 ; -6.35,-1 -6.35,-1.7 -6.15,-1.7 -6.15,-1 ; -5.85,1 -5.85,1.7 -5.65,1.7 -5.65,1 ; -5.35,-1 -5.35,-1.7 -5.15,-1.7 -5.15,-1 ; -4.85,1 -4.85,1.7 -4.65,1.7 -4.65,1 ; -4.35,-1 -4.35,-1.7 -4.15,-1.7 -4.15,-1 ; -3.85,1 -3.85,1.7 -3.65,1.7 -3.65,1 ; -3.35,-1 -3.35,-1.7 -3.15,-1.7 -3.15,-1 ; -2.85,1 -2.85,1.7 -2.65,1.7 -2.65,1 ; -2.35,-1 -2.35,-1.7 -2.15,-1.7 -2.15,-1 ; -1.85,1 -1.85,1.7 -1.65,1.7 -1.65,1 ; -1.35,-1 -1.35,-1.7 -1.15,-1.7 -1.15,-1 ; -0.85,1 -0.85,1.7 -0.65,1.7 -0.65,1 ; -0.35,-1 -0.35,-1.7 -0.15,-1.7 -0.15,-1 ; 0.15,1 0.15,1.7 0.35,1.7 0.35,1 ; 0.65,-1 0.65,-1.7 0.85,-1.7 0.85,-1 ; 1.15,1 1.15,1.7 1.35,1.7 1.35,1 ; 1.65,-1 1.65,-1.7 1.85,-1.7 1.85,-1 ; 2.15,1 2.15,1.7 2.35,1.7 2.35,1 ; 2.65,-1 2.65,-1.7 2.85,-1.7 2.85,-1 ; 3.15,1 3.15,1.7 3.35,1.7 3.35,1 ; 3.65,-1 3.65,-1.7 3.85,-1.7 3.85,-1 ; 4.15,1 4.15,1.7 4.35,1.7 4.35,1 ; 4.65,-1 4.65,-1.7 4.85,-1.7 4.85,-1 ; 5.15,1 5.15,1.7 5.35,1.7 5.35,1 ; 5.65,-1 5.65,-1.7 5.85,-1.7 5.85,-1 ; 6.15,1 6.15,1.7 6.35,1.7 6.35,1 ; 6.65,-1 6.65,-1.7 6.85,-1.7 6.85,-1 ; 7.15,1 7.15,1.7 7.35,1.7 7.35,1 ; 7.65,-1 7.65,-1.7 7.85,-1.7 7.85,-1 ; 8.15,1 8.15,1.7 8.35,1.7 8.35,1 ; 9.15,-1 9.15,-1.75 9.35,-1.75 9.35,-1 ; 9.15,1 9.15,1.75 9.35,1.75 9.35,1 ; -11.7,-1 11.7,-1 11.7,1 -11.7,1 -11.7,-1
Top Designator:
  text ".Designator" at -3.647,-0.357 h1
Top 3D Body:
  lines w0.1: -9.35,-1 -9.35,-1.75 -9.15,-1.75 -9.15,-1 ; -9.35,1 -9.35,1.75 -9.15,1.75 -9.15,1 ; -8.35,-1 -8.35,-1.7 -8.15,-1.7 -8.15,-1 ; -7.85,1 -7.85,1.7 -7.65,1.7 -7.65,1 ; -7.35,-1 -7.35,-1.7 -7.15,-1.7 -7.15,-1 ; -6.85,1 -6.85,1.7 -6.65,1.7 -6.65,1 ; -6.35,-1 -6.35,-1.7 -6.15,-1.7 -6.15,-1 ; -5.85,1 -5.85,1.7 -5.65,1.7 -5.65,1 ; -5.35,-1 -5.35,-1.7 -5.15,-1.7 -5.15,-1 ; -4.85,1 -4.85,1.7 -4.65,1.7 -4.65,1 ; -4.35,-1 -4.35,-1.7 -4.15,-1.7 -4.15,-1 ; -3.85,1 -3.85,1.7 -3.65,1.7 -3.65,1 ; -3.35,-1 -3.35,-1.7 -3.15,-1.7 -3.15,-1 ; -2.85,1 -2.85,1.7 -2.65,1.7 -2.65,1 ; -2.35,-1 -2.35,-1.7 -2.15,-1.7 -2.15,-1 ; -1.85,1 -1.85,1.7 -1.65,1.7 -1.65,1 ; -1.35,-1 -1.35,-1.7 -1.15,-1.7 -1.15,-1 ; -0.85,1 -0.85,1.7 -0.65,1.7 -0.65,1 ; -0.35,-1 -0.35,-1.7 -0.15,-1.7 -0.15,-1 ; 0.15,1 0.15,1.7 0.35,1.7 0.35,1 ; 0.65,-1 0.65,-1.7 0.85,-1.7 0.85,-1 ; 1.15,1 1.15,1.7 1.35,1.7 1.35,1 ; 1.65,-1 1.65,-1.7 1.85,-1.7 1.85,-1 ; 2.15,1 2.15,1.7 2.35,1.7 2.35,1 ; 2.65,-1 2.65,-1.7 2.85,-1.7 2.85,-1 ; 3.15,1 3.15,1.7 3.35,1.7 3.35,1 ; 3.65,-1 3.65,-1.7 3.85,-1.7 3.85,-1 ; 4.15,1 4.15,1.7 4.35,1.7 4.35,1 ; 4.65,-1 4.65,-1.7 4.85,-1.7 4.85,-1 ; 5.15,1 5.15,1.7 5.35,1.7 5.35,1 ; 5.65,-1 5.65,-1.7 5.85,-1.7 5.85,-1 ; 6.15,1 6.15,1.7 6.35,1.7 6.35,1 ; 6.65,-1 6.65,-1.7 6.85,-1.7 6.85,-1 ; 7.15,1 7.15,1.7 7.35,1.7 7.35,1 ; 7.65,-1 7.65,-1.7 7.85,-1.7 7.85,-1 ; 8.15,1 8.15,1.7 8.35,1.7 8.35,1 ; 9.15,-1 9.15,-1.75 9.35,-1.75 9.35,-1 ; 9.15,1 9.15,1.75 9.35,1.75 9.35,1 ; -11.7,-1 -11.7,1 11.7,1 11.7,-1 -11.7,-1
Top Courtyard:
  lines w0.05: -11.975,-2.35 11.975,-2.35 11.975,2.35 -11.975,2.35 -11.975,-2.35
Top Component Center:
  lines w0.1: -0.5,0 0.5,0 ; 0,-0.5 0,0.5
3D body "687334124422.stp": height 4.92, standoff 0.02, extent -11.7,-1.75 11.7,1.75

## 687340124422 [mm] "ZIF Connectors, Vertical, Type A, pitch 0.5mm, 40p"
height 4.5
pads (44):
  rect 0.4x1.5 smd: 1(-9.75,-1.4) 2(-9.25,1.4) 3(-8.75,-1.4) 4(-8.25,1.4) 5(-7.75,-1.4) 6(-7.25,1.4) 7(-6.75,-1.4) 8(-6.25,1.4) 9(-5.75,-1.4) 10(-5.25,1.4) 11(-4.75,-1.4) 12(-4.25,1.4) 13(-3.75,-1.4) 14(-3.25,1.4) 15(-2.75,-1.4) 16(-2.25,1.4) 17(-1.75,-1.4) 18(-1.25,1.4) 19(-0.75,-1.4) 20(-0.25,1.4) 21(0.25,-1.4) 22(0.75,1.4) 23(1.25,-1.4) 24(1.75,1.4) 25(2.25,-1.4) 26(2.75,1.4) 27(3.25,-1.4) 28(3.75,1.4) 29(4.25,-1.4) 30(4.75,1.4) 31(5.25,-1.4) 32(5.75,1.4) 33(6.25,-1.4) 34(6.75,1.4) 35(7.25,-1.4) 36(7.75,1.4) 37(8.25,-1.4) 38(8.75,1.4) 39(9.25,-1.4) 40(9.75,1.4)
  rect 0.8x1.5 smd: M1(-10.75,-1.4) M2(-10.75,1.4) M3(10.75,-1.4) M4(10.75,1.4)
Top Overlay:
  circle w0.25: c-9.75,-2.625 r0.125
  lines w0.2: -11.45,-1.075 -13.275,-1.075 -13.275,1.075 -11.45,1.075 ; 11.45,-1.075 13.275,-1.075 13.275,1.075 11.45,1.075
Top Assembly:
  lines w0.1: -10.85,-1 -10.85,-1.75 -10.65,-1.75 -10.65,-1 ; -10.85,1 -10.85,1.75 -10.65,1.75 -10.65,1 ; -9.85,-1 -9.85,-1.7 -9.65,-1.7 -9.65,-1 ; -9.35,1 -9.35,1.7 -9.15,1.7 -9.15,1 ; -8.85,-1 -8.85,-1.7 -8.65,-1.7 -8.65,-1 ; -8.35,1 -8.35,1.7 -8.15,1.7 -8.15,1 ; -7.85,-1 -7.85,-1.7 -7.65,-1.7 -7.65,-1 ; -7.35,1 -7.35,1.7 -7.15,1.7 -7.15,1 ; -6.85,-1 -6.85,-1.7 -6.65,-1.7 -6.65,-1 ; -6.35,1 -6.35,1.7 -6.15,1.7 -6.15,1 ; -5.85,-1 -5.85,-1.7 -5.65,-1.7 -5.65,-1 ; -5.35,1 -5.35,1.7 -5.15,1.7 -5.15,1 ; -4.85,-1 -4.85,-1.7 -4.65,-1.7 -4.65,-1 ; -4.35,1 -4.35,1.7 -4.15,1.7 -4.15,1 ; -3.85,-1 -3.85,-1.7 -3.65,-1.7 -3.65,-1 ; -3.35,1 -3.35,1.7 -3.15,1.7 -3.15,1 ; -2.85,-1 -2.85,-1.7 -2.65,-1.7 -2.65,-1 ; -2.35,1 -2.35,1.7 -2.15,1.7 -2.15,1 ; -1.85,-1 -1.85,-1.7 -1.65,-1.7 -1.65,-1 ; -1.35,1 -1.35,1.7 -1.15,1.7 -1.15,1 ; -0.85,-1 -0.85,-1.7 -0.65,-1.7 -0.65,-1 ; -0.35,1 -0.35,1.7 -0.15,1.7 -0.15,1 ; 0.15,-1 0.15,-1.7 0.35,-1.7 0.35,-1 ; 0.65,1 0.65,1.7 0.85,1.7 0.85,1 ; 1.15,-1 1.15,-1.7 1.35,-1.7 1.35,-1 ; 1.65,1 1.65,1.7 1.85,1.7 1.85,1 ; 2.15,-1 2.15,-1.7 2.35,-1.7 2.35,-1 ; 2.65,1 2.65,1.7 2.85,1.7 2.85,1 ; 3.15,-1 3.15,-1.7 3.35,-1.7 3.35,-1 ; 3.65,1 3.65,1.7 3.85,1.7 3.85,1 ; 4.15,-1 4.15,-1.7 4.35,-1.7 4.35,-1 ; 4.65,1 4.65,1.7 4.85,1.7 4.85,1 ; 5.15,-1 5.15,-1.7 5.35,-1.7 5.35,-1 ; 5.65,1 5.65,1.7 5.85,1.7 5.85,1 ; 6.15,-1 6.15,-1.7 6.35,-1.7 6.35,-1 ; 6.65,1 6.65,1.7 6.85,1.7 6.85,1 ; 7.15,-1 7.15,-1.7 7.35,-1.7 7.35,-1 ; 7.65,1 7.65,1.7 7.85,1.7 7.85,1 ; 8.15,-1 8.15,-1.7 8.35,-1.7 8.35,-1 ; 8.65,1 8.65,1.7 8.85,1.7 8.85,1 ; 9.15,-1 9.15,-1.7 9.35,-1.7 9.35,-1 ; 9.65,1 9.65,1.7 9.85,1.7 9.85,1 ; 10.65,-1 10.65,-1.75 10.85,-1.75 10.85,-1 ; 10.65,1 10.65,1.75 10.85,1.75 10.85,1 ; -13.2,-1 -13.2,1 13.2,1 13.2,-1 -13.2,-1
Top Designator:
  text ".Designator" at -3.647,-0.357 h1
Top 3D Body:
  lines w0.1: -10.85,-1 -10.85,-1.75 -10.65,-1.75 -10.65,-1 ; -10.85,1 -10.85,1.75 -10.65,1.75 -10.65,1 ; -9.85,-1 -9.85,-1.7 -9.65,-1.7 -9.65,-1 ; -9.35,1 -9.35,1.7 -9.15,1.7 -9.15,1 ; -8.85,-1 -8.85,-1.7 -8.65,-1.7 -8.65,-1 ; -8.35,1 -8.35,1.7 -8.15,1.7 -8.15,1 ; -7.85,-1 -7.85,-1.7 -7.65,-1.7 -7.65,-1 ; -7.35,1 -7.35,1.7 -7.15,1.7 -7.15,1 ; -6.85,-1 -6.85,-1.7 -6.65,-1.7 -6.65,-1 ; -6.35,1 -6.35,1.7 -6.15,1.7 -6.15,1 ; -5.85,-1 -5.85,-1.7 -5.65,-1.7 -5.65,-1 ; -5.35,1 -5.35,1.7 -5.15,1.7 -5.15,1 ; -4.85,-1 -4.85,-1.7 -4.65,-1.7 -4.65,-1 ; -4.35,1 -4.35,1.7 -4.15,1.7 -4.15,1 ; -3.85,-1 -3.85,-1.7 -3.65,-1.7 -3.65,-1 ; -3.35,1 -3.35,1.7 -3.15,1.7 -3.15,1 ; -2.85,-1 -2.85,-1.7 -2.65,-1.7 -2.65,-1 ; -2.35,1 -2.35,1.7 -2.15,1.7 -2.15,1 ; -1.85,-1 -1.85,-1.7 -1.65,-1.7 -1.65,-1 ; -1.35,1 -1.35,1.7 -1.15,1.7 -1.15,1 ; -0.85,-1 -0.85,-1.7 -0.65,-1.7 -0.65,-1 ; -0.35,1 -0.35,1.7 -0.15,1.7 -0.15,1 ; 0.15,-1 0.15,-1.7 0.35,-1.7 0.35,-1 ; 0.65,1 0.65,1.7 0.85,1.7 0.85,1 ; 1.15,-1 1.15,-1.7 1.35,-1.7 1.35,-1 ; 1.65,1 1.65,1.7 1.85,1.7 1.85,1 ; 2.15,-1 2.15,-1.7 2.35,-1.7 2.35,-1 ; 2.65,1 2.65,1.7 2.85,1.7 2.85,1 ; 3.15,-1 3.15,-1.7 3.35,-1.7 3.35,-1 ; 3.65,1 3.65,1.7 3.85,1.7 3.85,1 ; 4.15,-1 4.15,-1.7 4.35,-1.7 4.35,-1 ; 4.65,1 4.65,1.7 4.85,1.7 4.85,1 ; 5.15,-1 5.15,-1.7 5.35,-1.7 5.35,-1 ; 5.65,1 5.65,1.7 5.85,1.7 5.85,1 ; 6.15,-1 6.15,-1.7 6.35,-1.7 6.35,-1 ; 6.65,1 6.65,1.7 6.85,1.7 6.85,1 ; 7.15,-1 7.15,-1.7 7.35,-1.7 7.35,-1 ; 7.65,1 7.65,1.7 7.85,1.7 7.85,1 ; 8.15,-1 8.15,-1.7 8.35,-1.7 8.35,-1 ; 8.65,1 8.65,1.7 8.85,1.7 8.85,1 ; 9.15,-1 9.15,-1.7 9.35,-1.7 9.35,-1 ; 9.65,1 9.65,1.7 9.85,1.7 9.85,1 ; 10.65,-1 10.65,-1.75 10.85,-1.75 10.85,-1 ; 10.65,1 10.65,1.75 10.85,1.75 10.85,1 ; -13.2,-1 13.2,-1 13.2,1 -13.2,1 -13.2,-1
Top Courtyard:
  lines w0.05: -13.475,-2.35 -13.475,2.35 13.475,2.35 13.475,-2.35 -13.475,-2.35
Top Component Center:
  lines w0.1: -0.5,0 0.5,0 ; 0,-0.5 0,0.5
3D body "687340124422.stp": height 4.92, standoff 0.02, extent -13.2,-1.75 13.2,1.75

## 687350124422 [mm] "ZIF Connectors, Vertical, Type A, pitch 0.5mm, 50p"
height 4.5
pads (54):
  rect 0.4x1.5 smd: 1(-12.25,-1.4) 2(-11.75,1.4) 3(-11.25,-1.4) 4(-10.75,1.4) 5(-10.25,-1.4) 6(-9.75,1.4) 7(-9.25,-1.4) 8(-8.75,1.4) 9(-8.25,-1.4) 10(-7.75,1.4) 11(-7.25,-1.4) 12(-6.75,1.4) 13(-6.25,-1.4) 14(-5.75,1.4) 15(-5.25,-1.4) 16(-4.75,1.4) 17(-4.25,-1.4) 18(-3.75,1.4) 19(-3.25,-1.4) 20(-2.75,1.4) 21(-2.25,-1.4) 22(-1.75,1.4) 23(-1.25,-1.4) 24(-0.75,1.4) 25(-0.25,-1.4) 26(0.25,1.4) 27(0.75,-1.4) 28(1.25,1.4) 29(1.75,-1.4) 30(2.25,1.4) 31(2.75,-1.4) 32(3.25,1.4) 33(3.75,-1.4) 34(4.25,1.4) 35(4.75,-1.4) 36(5.25,1.4) 37(5.75,-1.4) 38(6.25,1.4) 39(6.75,-1.4) 40(7.25,1.4) 41(7.75,-1.4) 42(8.25,1.4) 43(8.75,-1.4) 44(9.25,1.4) 45(9.75,-1.4) 46(10.25,1.4) 47(10.75,-1.4) 48(11.25,1.4) 49(11.75,-1.4) 50(12.25,1.4)
  rect 0.8x1.5 smd: M1(-13.25,-1.4) M2(-13.25,1.4) M3(13.25,-1.4) M4(13.25,1.4)
Top Overlay:
  circle w0.25: c-12.25,-2.625 r0.125
  lines w0.2: -13.95,-1.075 -15.775,-1.075 -15.775,1.075 -13.95,1.075 ; 13.95,-1.075 15.775,-1.075 15.775,1.075 13.95,1.075
Top Assembly:
  drawing of 166 lines, arcs and shapes, not listed
Top Designator:
  text ".Designator" at -3.647,-0.357 h1
Top 3D Body:
  drawing of 166 lines, arcs and shapes, not listed
Top Courtyard:
  lines w0.05: -15.975,-2.35 15.975,-2.35 15.975,2.35 -15.975,2.35 -15.975,-2.35
Top Component Center:
  lines w0.1: -0.5,0 0.5,0 ; 0,-0.5 0,0.5
3D body "687350124422.stp": height 4.92, standoff 0.02, extent -15.7,-1.75 15.7,1.75